# Altium footprint library FTP.PcbLib: 207 footprints (part 2 of 13)
Each footprint in its own frame and in the unit in brackets; x right, y up, seen from the top. Pads: shape width x height; smd on the part's side, far side on the other; paste and mask are expansions set on the pad; w line width, h text height; cw(c..) or ccw(c..) is an arc to the next point about the centre after c.
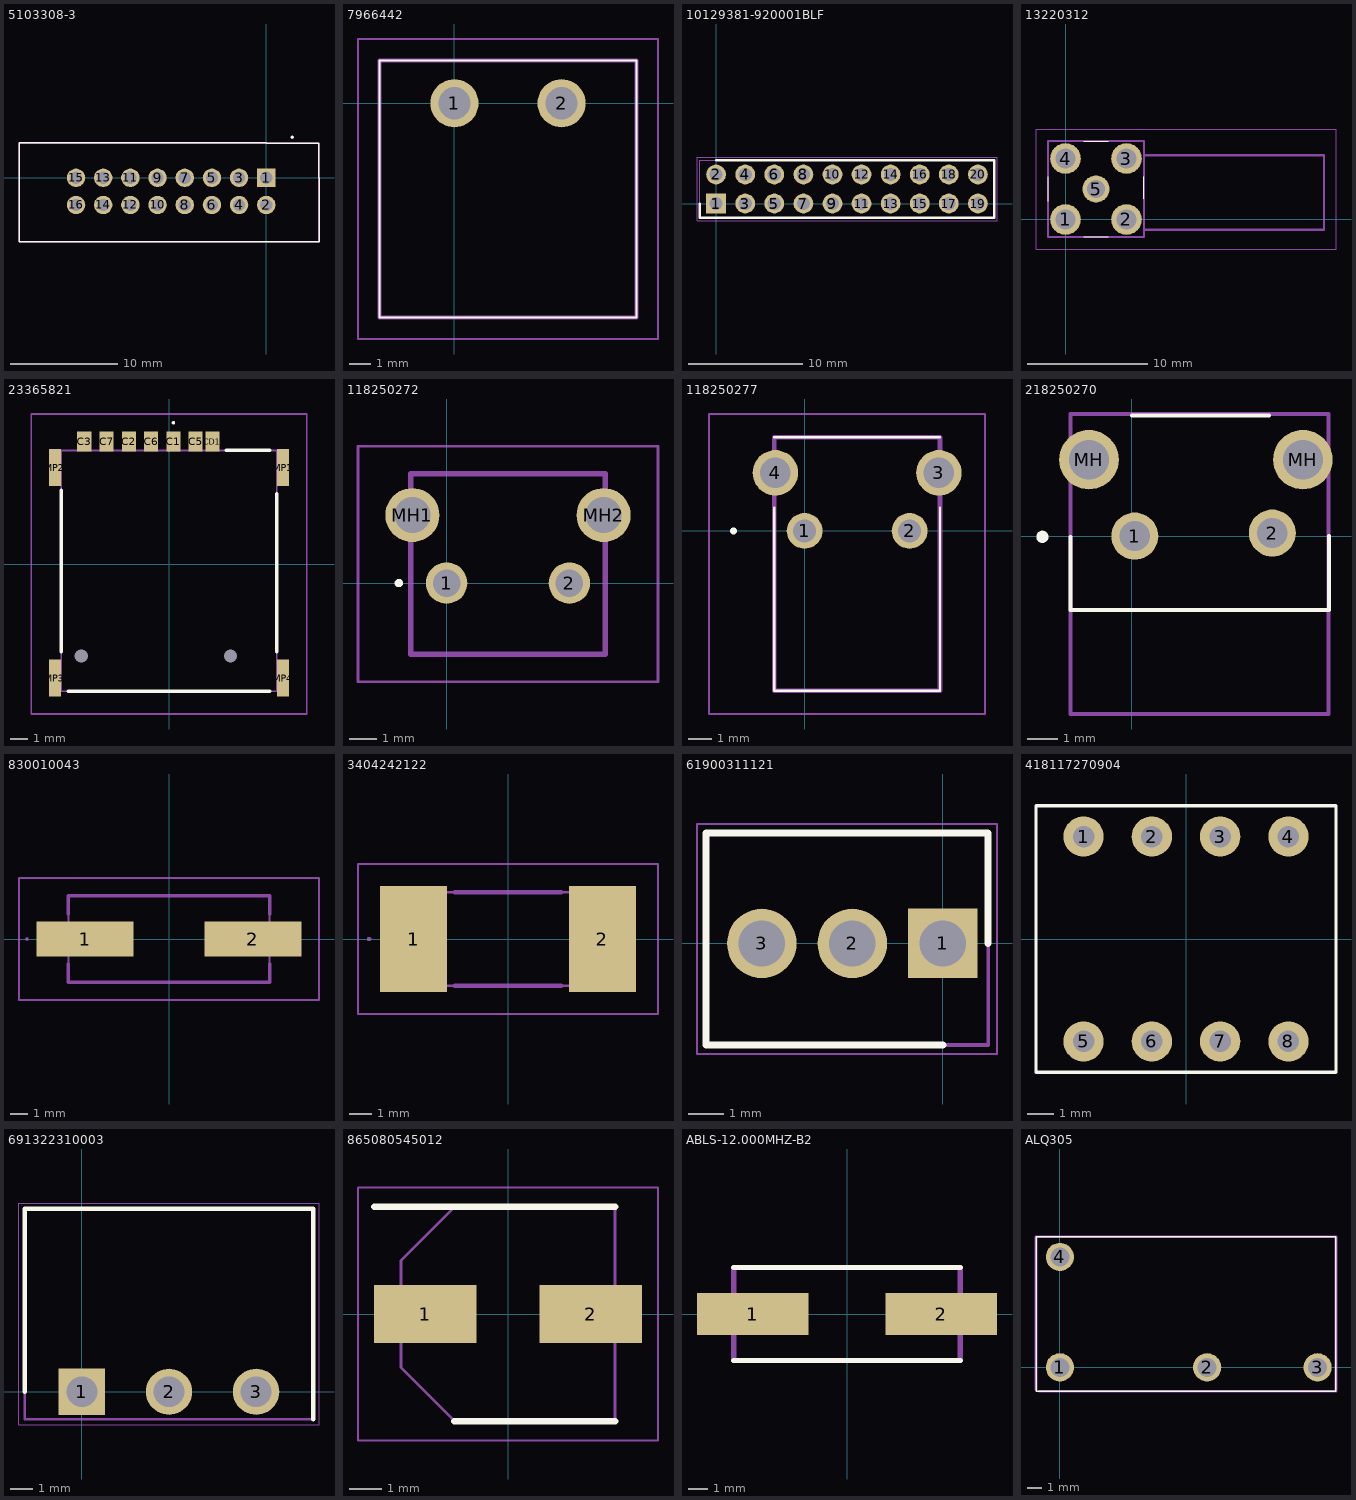
[diagram p1: the footprints below, top view; thin cyan lines are the x and y axes]

## 5103308-3 [mm]
pads (16):
  rect 1.725x1.725 hole 1.15: 1(0,0)
  round 1.725 hole 1.15: 2(0,-2.54) 3(-2.54,0) 4(-2.54,-2.54) 5(-5.08,0) 6(-5.08,-2.54) 7(-7.62,0) 8(-7.62,-2.54) 9(-10.16,0) 10(-10.16,-2.54) 11(-12.7,0) 12(-12.7,-2.54) 13(-15.24,0) 14(-15.24,-2.54) 15(-17.78,0) 16(-17.78,-2.54)
Top Overlay:
  circle w0.152: c2.425,3.8 r0.076
  lines w0.127: 0,3.25 4.925,3.25 4.925,0.004 ; 0,3.255 -23.11,3.255 -23.11,-5.969 4.929,-5.969 4.929,0
Mechanical 13:
  lines w0.1: -23.11,-5.969 4.925,-5.969 4.925,3.25 -23.11,3.25 -23.11,-5.969
Mechanical 15:
  lines w0.05: -23.11,-5.969 4.929,-5.969 4.929,3.255 -23.11,3.255 -23.11,-5.969
3D body "5103308-3.stp": height 10, standoff -2.9, extent -23.07,-5.944 4.87,3.2

## 7966442 [mm]
pads (2):
  round 2.25 hole 1.5: 1(0,0) 2(5,0)
Top Overlay:
  lines w0.1: -3.5,-10 8.5,-10 8.5,2 -3.5,2 -3.5,-10
Mechanical 15:
  lines w0.2: -3.5,-10 8.5,-10 8.5,2 -3.5,2 -3.5,-10
Mechanical 20:
  lines w0.1: -4.5,-11 9.5,-11 9.5,3 -4.5,3 -4.5,-11
3D body "796644-2.stp": height 8.5, standoff -3.35, extent -3.5,-10 8.5,2

## 10129381-920001BLF [mm]
pads (20):
  rect 1.725x1.725 / inner round 1.725 / far side rect 1.725x1.725 hole 1.15: 1(0,0)
  round 1.725 hole 1.15: 2(0,2.54) 3(2.54,0) 4(2.54,2.54) 5(5.08,0) 6(5.08,2.54) 7(7.62,0) 8(7.62,2.54) 9(10.16,0) 10(10.16,2.54) 11(12.7,0) 12(12.7,2.54) 13(15.24,0) 14(15.24,2.54) 15(17.78,0) 16(17.78,2.54) 17(20.32,0) 18(20.32,2.54) 19(22.86,0) 20(22.86,2.54)
Top Overlay:
  lines w0.2: -1.42,0 -1.42,-1.245 24.28,-1.245 24.28,3.785 0,3.785
Mechanical 15:
  lines w0.1: -1.42,-1.245 -1.42,3.785 24.28,3.785 24.28,-1.245 -1.42,-1.245
Mechanical 20:
  lines w0.05: -1.67,-1.495 -1.67,4.035 24.53,4.035 24.53,-1.495 -1.67,-1.495
3D body "10129381-920001BLF.stp": height 8.58, standoff -3.3, extent -1.27,-1.145 24.13,3.685

## 13220312 [mm]
pads (5):
  round 2.55 hole 1.7: 1(0,0) 2(5.08,0) 3(5.08,5.08) 4(0,5.08)
  round 2.25 hole 1.5: 5(2.54,2.54)
Top Overlay:
  lines w0.1: -1.46,1.54 -1.46,3.54 ; 1.54,-1.46 3.54,-1.46 ; 1.54,6.54 3.54,6.54 ; 6.54,1.74 6.54,3.54
Mechanical 1:
  lines w0.1: 6.54,-0.86 21.54,-0.86 21.54,5.34 6.54,5.34
Mechanical 15:
  lines w0.2: 6.54,-0.86 21.54,-0.86 21.54,5.34 6.54,5.34 ; -1.46,-1.46 -1.46,6.54 6.54,6.54 6.54,-1.46 -1.46,-1.46
Mechanical 20:
  lines w0.1: -2.46,-2.46 -2.46,7.54 22.54,7.54 22.54,-2.46 -2.46,-2.46
3D body "132203-12.stp": height 11.61, standoff -3.79, extent -1.46,-2.553 22.04,7.633

## 23365821 [mm]
pads (13):
  rect 0.8x1.14 smd: C1(0.25,6.98) C2(-2.29,6.98) C3(-4.83,6.98) C5(1.52,6.98) C6(-1.02,6.98) C7(-3.56,6.98) CD1(2.47,6.98)
  round 0.375 hole 0.75 unplated: MH1(3.5,-5.25) MH2(-5,-5.25)
  rect 0.7x2.1 smd: MP1(6.5,5.5) MP2(-6.5,5.5) MP3(-6.5,-6.5) MP4(6.5,-6.5)
Top Overlay:
  lines w0.1: 0.25,8 cw(c0.25,8.05) 0.25,8.1 cw(c0.25,8.05) 0.25,8
  lines w0.2: -6.145,-5 -6.145,4.2 ; -5.75,-7.25 5.75,-7.25 ; 3.25,6.47 5.75,6.47 ; 6.145,-5 6.145,4
Mechanical 15:
  lines w0.1: -6.145,-7.25 -6.145,6.47 6.145,6.47 6.145,-7.25 -6.145,-7.25
Mechanical 20:
  lines w0.1: -7.85,-8.55 -7.85,8.55 7.85,8.55 7.85,-8.55 -7.85,-8.55
3D body "2336582-1.stp": height 1.34, standoff -0.43, extent -6.59,-7.29 6.5,7.29

## 118250272 [mm]
pads (4):
  round 1.515 hole 1.01: 1(0,0) 2(4.5,0)
  round 1.98 hole 1.32: MH1(-1.255,2.49) MH2(5.755,2.49)
Top Overlay:
  lines w0.2: -1.8,0 ccw(c-1.75,0) -1.7,0 ; -1.8,0 cw(c-1.75,0) -1.7,0 ; -1.8,0 ccw(c-1.75,0) -1.7,0
Mechanical 15:
  lines w0.2: -1.305,-2.61 -1.305,4.01 5.805,4.01 5.805,-2.61 -1.305,-2.61
Mechanical 20:
  lines w0.1: -3.245,-3.61 -3.245,5.01 7.745,5.01 7.745,-3.61 -3.245,-3.61
3D body "1-1825027-2.stp": height 7.26, standoff -3.26, extent -2.005,-8.35 6.405,4.01

## 118250277 [mm]
pads (4):
  round 1.54 hole 0.99: 1(0,0) 2(4.5,0)
  round 1.95 hole 1.3: 3(5.755,2.49) 4(-1.255,2.49)
Top Overlay:
  lines w0.1: -1.305,-6.85 -1.305,1 -1.305,-6.85 ; -1.305,-6.85 5.805,-6.85 ; -1.305,-6.85 5.805,-6.85 ; 5.805,-6.85 5.805,1 5.805,-6.85 ; -1.305,4 -1.305,4.01 5.805,4.01 5.805,4 -1.305,4
  lines w0.2: -3.1,0 ccw(c-3.05,0) -3,0 ; -3.1,0 cw(c-3.05,0) -3,0 ; -3.1,0 ccw(c-3.05,0) -3,0
Mechanical 15:
  lines w0.2: -1.305,-6.85 -1.305,4.01 5.805,4.01 5.805,-6.85 -1.305,-6.85
Mechanical 20:
  lines w0.1: -4.1,-7.85 -4.1,5.01 7.73,5.01 7.73,-7.85 -4.1,-7.85
3D body "1-1825027-7.STEP": height 8.08, standoff -2.44, extent -1.918,-6.782 6.49,4.077

## 218250270 [mm]
pads (4):
  round 1.54 hole 0.99: 1(0.1,0) 2(4.6,0.1)
  round 1.95 hole 1.3: MH(-1.4,2.5) MH(5.6,2.5)
Top Overlay:
  circle w0.2: c-2.925,-0.025 r0.1
  lines w0.127: -2.004,-0.025 -2.004,-2.425 -1.925,-2.425 6.45,-2.425 6.45,0 ; 0,3.942 4.5,3.942
Mechanical 15:
  lines w0.127: -2.004,-5.822 -2.004,-5.673 -2.004,3.994 6.439,3.994 6.439,-5.822 -2.004,-5.822
3D body "c-1825027-8-g-3d.STEP": height 7, standoff -3.52, extent -2.011,-5.822 6.397,4.021

## 830010043 [mm]
pads (2):
  rect 5.5x2 smd: 1(-4.75,0) 2(4.75,0)
Assembly Bottom:
  lines w0.1: -8.5,-3.45 -8.5,3.45 8.5,3.45 8.5,-3.45 -8.5,-3.45 ; -5.7,-2.45 -5.7,2.45 5.7,2.45 5.7,-2.45 -5.7,-2.45
3D Body Bottom:
  lines w0.1: -8.1,0 ccw(c-8.05,0) -8,0 ccw(c-8.05,0) -8.1,0
  lines w0.2: -5.7,-1.4 -5.7,-2.45 5.7,-2.45 5.7,-1.4 ; -5.7,1.4 -5.7,2.45 5.7,2.45 5.7,1.4
3D body "ECS-160-18-28AX-TR.stp": height 4, standoff -1, extent -6.25,-2.875 6.25,2.875

## 3404242122 [mm]
pads (2):
  rect 3x4.75 smd: 1(-4.25,0) 2(4.25,0)
Assembly Bottom:
  lines w0.1: -6.75,-3.375 -6.75,3.375 6.75,3.375 6.75,-3.375 -6.75,-3.375 ; -5.65,-2.1 -5.65,2.1 5.65,2.1 5.65,-2.1 -5.65,-2.1
3D Body Bottom:
  lines w0.1: -6.3,0 ccw(c-6.25,0) -6.2,0 ; -6.3,0 cw(c-6.25,0) -6.2,0 ; -6.3,0 ccw(c-6.25,0) -6.2,0
  lines w0.2: -2.4,-2.1 2.4,-2.1 ; -2.4,2.1 2.4,2.1
3D body "3404.2421.22.stp": height 4.12, standoff 0.12, extent -5.706,-2.02 5.594,2.18

## 61900311121 [mm]
pads (3):
  rect 1.95x1.95 / inner round 1.95 / far side rect 1.95x1.95 hole 1.3: 1(0,0)
  round 1.95 hole 1.3: 2(-2.54,0) 3(-5.08,0)
Top Overlay:
  lines w0.2: 0,-2.85 -6.65,-2.85 -6.65,3.1 1.27,3.1 1.27,0
Mechanical 15:
  lines w0.1: -6.65,-2.85 -6.65,3.1 1.27,3.1 1.27,-2.85 -6.65,-2.85
Mechanical 20:
  lines w0.05: -6.9,-3.1 -6.9,3.35 1.52,3.35 1.52,-3.1 -6.9,-3.1
3D body "61900311121.stp": height 11.75, standoff -3.7, extent -6.5,-2.7 1.12,3.1

## 418117270904 [mm]
pads (8):
  round 1.5 hole 0.8 mask+0.05: 1(-3.81,3.81) 2(-1.27,3.81) 3(1.27,3.81) 4(3.81,3.81) 5(-3.81,-3.81) 6(-1.27,-3.81) 7(1.27,-3.81) 8(3.81,-3.81)
Top Overlay:
  lines w0.127: -5.58,-4.95 -5.58,4.95 5.58,4.95 5.58,-4.95 -5.58,-4.95
3D body "418117270904_Download_STP_418117270904_rev1.stp": height 6.9, standoff -3.65, extent -5.58,-4.95 5.58,4.95

## 691322310003 [mm]
pads (3):
  rect 2.025x2.025 / inner round 2.025 / far side rect 2.025x2.025 hole 1.35: 1(0,0)
  round 2.025 hole 1.35: 2(3.81,0) 3(7.62,0)
Top Overlay:
  lines w0.2: -2.5,0 -2.5,8 10.12,8 10.12,-1.2
Mechanical 15:
  lines w0.1: -2.5,-1.2 10.12,-1.2 10.12,8 -2.5,8 -2.5,-1.2
Mechanical 20:
  lines w0.05: -2.75,-1.45 -2.75,8.25 10.37,8.25 10.37,-1.45 -2.75,-1.45
3D body "691322310003 (rev1).stp": height 7.4, standoff -3.3, extent -2.5,-1.1 10.12,8.1

## 865080545012 [mm]
pads (2):
  rect 3.15x1.8 smd: 1(-2.55,0) 2(2.55,0)
Top Overlay:
  lines w0.2: -4.125,3.3 3.3,3.3 ; -1.65,-3.3 3.3,-3.3
Mechanical 15:
  lines w0.1: -3.3,-1.65 -1.65,-3.3 3.3,-3.3 3.3,3.3 -1.65,3.3 -3.3,1.65 -3.3,-1.65
Mechanical 20:
  lines w0.05: -4.625,-3.9 -4.625,3.9 4.625,3.9 4.625,-3.9 -4.625,-3.9
3D body "865080545012.stp": height 7.7, standoff 0, extent -3.4,-3.4 3.4,3.4

## ABLS-12.000MHZ-B2 [mm]
pads (2):
  rect 5.6x2.1 smd: 1(-4.75,0) 2(4.75,0)
Top Overlay:
  lines w0.254: -5.7,-2.35 5.7,-2.35 ; -5.7,2.35 5.7,2.35
Mechanical 15:
  lines w0.254: -5.7,-2.35 5.7,-2.35 5.7,2.35 -5.7,2.35 -5.7,-2.35
3D body "User Library-hc49_cystal.STEP": height 5.08, standoff 0, extent -6.827,-2.45 6.573,2.45

## ALQ305 [mm]
pads (4):
  round 1.95 hole 1.3: 1(0,0) 2(10.16,0) 3(17.78,0) 4(0,7.62)
Top Overlay:
  lines w0.1: -1.651,-1.651 -1.651,9.017 19.05,9.017 19.05,-1.651 -1.651,-1.651
Mechanical 15:
  lines w0.2: -1.651,-1.524 -1.651,9.017 19.05,9.017 19.05,-1.524 ; -1.397,-1.651 19.05,-1.651
3D body "ALQ305.stp": height 15.1, standoff -5, extent -1.245,-1.317 18.755,8.683